# Altium integrated library Altium_Button.IntLib: 81 symbols (part 2 of 3)
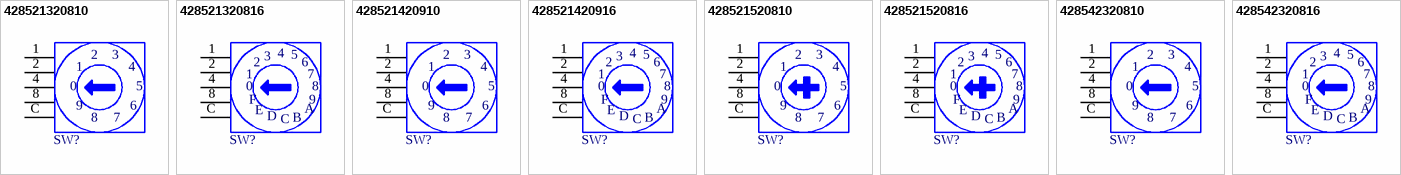
[diagram p5: symbols 428521320810 to 428542320816]

## 428542320816
designator SW?  (value not drawn)
WS-ROSV SMT Rotary Switch with Arrow Type Actuator, 7 x 7mm, Arrow Type, 16p; Manufacturer: Wurth Elektronik; Cover Material: Stainless Steel; Number of Positions: 16; Rated Current: 100mA; Rated Voltage: 42VDC; Washable: Yes; Manufacturer Part Number: 428542320816; Category: Rotary Switches; Match Code: WS-ROSV; Mount: Surface Mount; Operating Temperature Max: 125°C; Operating Temperature Min: -60°C; Packaging: Tape and Reel; Length: 7mm; Width: 7mm; Height: 3.85mm; Actuator Type: Arrow Type; Terminal Plating: Gold; Supplier 1 URL: https://www.mouser.com/ProductDetail/Wurth-Elektronik/428542320816?qs=wr8lucFkNMUrQL8A0L1uyg%3D%3D; Supplier 2 URL: https://www.digikey.com/en/products/detail/w%C3%BCrth-elektronik/428542320816/5208980; Supplier 3 URL: N/A; LCSC Part #: N/A; Supplier 1: Mouser; Supplier 1 Part Number: 710-428542320816; Supplier 2: Digi-Key; Supplier 2 Part Number: 732-6989-2-ND; Supplier 3: thegioiic; Supplier 3 Part Number: OEM; Value: 428542320816; ComponentLink1Description: Datasheet; ComponentLink1URL: https://www.we-online.com/redexpert/spec/428542320816?ad
footprint 42854232081x_16p
pins: 1, 2, 4, 8, C
text: 3; 5; 6; 7; 0; F; 9; E; A; D; B


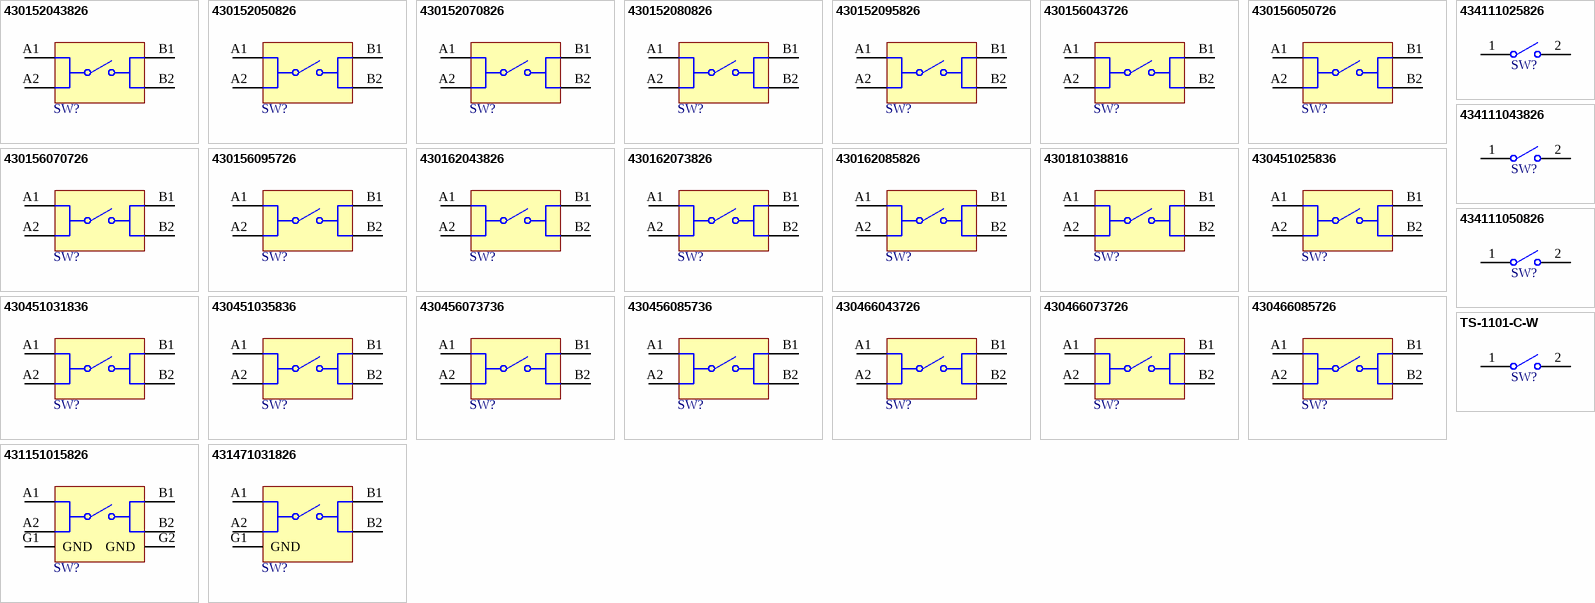
[diagram p2: symbols 430152043826 to TS-1101-C-W]

## 430152043826
designator SW?  (value not drawn)
WS-TASV SMT Tact Switch, L6 x W6 x H4.3mm, 260g, SPST-NO, 12V, 50mA; Manufacturer: Wurth Elektronik; Washable: No; Rated Voltage: 12VDC; Manufacturer Part Number: 430152043826; Category: Tact Switches; Match Code: WS-TASV; Mount: Surface Mount; Operating Temperature Max: 85°C; Operating Temperature Min: -40°C; Packaging: Tape and Reel; Length: 6mm; Width: 6mm; Height: 4.3mm; Circuit: SPST-NO; Contact Material: Stainless Steel; Operation Force: 260g; Rated Current: 50mA; Terminal Material: Copper Alloy; Terminal Plating: Silver; Supplier 1 URL: https://www.mouser.vn/ProductDetail/Wurth-Elektronik/430152043826?qs=wr8lucFkNMUjBcFj1giTsA%3D%3D; Supplier 2 URL: https://www.digikey.com/en/products/detail/w%C3%BCrth-elektronik/430152043826/5208994; Supplier 3 URL: https://www.thegioiic.com/nut-nhan-6x6mm-cao-4-3mm-4-chan-smd; LCSC Part #: N/A; ComponentLink1Description: Datasheet; ComponentLink1URL: https://www.we-online.com/redexpert/spec/430152043826?ad; Package / Case: 0805; Supplier 1: Mouser; Supplier 1 Part Number: 710-430152043826; Supplier 2: Digi-Key; Supplier 2 Part Number: 732-6991-2-ND; Supplier 3: thegioiic; Supplier 3 Part Number: OEM; Value: 430152043826
footprint WS-TASV_L6W6H4.3_4301x20438x6
pins: A1, A2, B1, B2

## 430152050826
designator SW?  (value not drawn)
WS-TASV SMT Tact Switch, L6 x W6 x H5mm, 260g, SPST-NO, 12V, 50mA; Manufacturer: Wurth Elektronik; Washable: No; Rated Voltage: 12VDC; Manufacturer Part Number: 430152050826; Category: Tact Switches; Match Code: WS-TASV; Mount: Surface Mount; Operating Temperature Max: 85°C; Operating Temperature Min: -40°C; Packaging: Tape and Reel; Length: 6mm; Width: 6mm; Height: 5mm; Circuit: SPST-NO; Contact Material: Stainless Steel; Operation Force: 260g; Rated Current: 50mA; Terminal Material: Copper Alloy; Terminal Plating: Silver; Supplier 1 URL: https://www.mouser.vn/ProductDetail/Wurth-Elektronik/430152050826?qs=wr8lucFkNMXbUWez0eOAow%3D%3D; Supplier 2 URL: https://www.digikey.com/en/products/detail/w%C3%BCrth-elektronik/430152050826/5208996; Supplier 3 URL: https://www.thegioiic.com/nut-nhan-6x6mm-cao-5mm-4-chan-smd; LCSC Part #: N/A; ComponentLink1Description: Datasheet; ComponentLink1URL: https://www.we-online.com/redexpert/spec/430152050826?ad; Package / Case: 0805; Supplier 1: Mouser; Supplier 1 Part Number: 710-430152050826; Supplier 2: Digi-Key; Supplier 2 Part Number: 732-6993-2-ND; Supplier 3: thegioiic; Supplier 3 Part Number: OEM; Value: 430152050826
footprint WS-TASV_L6W6H5_4301x20508x6
pins: A1, A2, B1, B2

## 430152070826
designator SW?  (value not drawn)
WS-TASV SMT Tact Switch, L6 x W6 x H7mm, 260g, SPST-NO, 12V, 50mA; Manufacturer: Wurth Elektronik; Washable: No; Rated Voltage: 12VDC; Manufacturer Part Number: 430152070826; Category: Tact Switches; Match Code: WS-TASV; Mount: Surface Mount; Operating Temperature Max: 85°C; Operating Temperature Min: -40°C; Packaging: Tape and Reel; Length: 6mm; Width: 6mm; Height: 7mm; Circuit: SPST-NO; Contact Material: Stainless Steel; Operation Force: 260g; Rated Current: 50mA; Terminal Material: Copper Alloy; Terminal Plating: Silver; Supplier 1 URL: https://www.mouser.vn/ProductDetail/Wurth-Elektronik/430152070826?qs=wr8lucFkNMU1ehywepWrdw%3D%3D; Supplier 2 URL: https://www.digikey.com/en/products/detail/w%C3%BCrth-elektronik/430152070826/5208998; Supplier 3 URL: https://www.thegioiic.com/nut-nhan-6x6mm-cao-7mm-4-chan-smd; LCSC Part #: N/A; ComponentLink1Description: Datasheet; ComponentLink1URL: https://www.we-online.com/redexpert/spec/430152070826?ad; Package / Case: 0805; Supplier 1: Mouser; Supplier 1 Part Number: 710-430152070826; Supplier 2: Digi-Key; Supplier 2 Part Number: 732-6995-2-ND; Supplier 3: thegioiic; Supplier 3 Part Number: OEM; Value: 430152070826
footprint WS-TASV_L6W6H7_4301x20708x6
pins: A1, A2, B1, B2

## 430152080826
designator SW?  (value not drawn)
WS-TASV SMT Tact Switch, L6 x W6 x H8mm, 260g, SPST-NO, 12V, 50mA; Manufacturer: Wurth Elektronik; Washable: No; Rated Voltage: 12VDC; Manufacturer Part Number: 430152080826; Category: Tact Switches; Match Code: WS-TASV; Mount: Surface Mount; Operating Temperature Max: 85°C; Operating Temperature Min: -40°C; Packaging: Tape and Reel; Length: 6mm; Width: 6mm; Height: 8mm; Circuit: SPST-NO; Contact Material: Stainless Steel; Operation Force: 260g; Rated Current: 50mA; Terminal Material: Copper Alloy; Terminal Plating: Silver; Supplier 1 URL: https://www.mouser.vn/ProductDetail/Wurth-Elektronik/430152080826?qs=wr8lucFkNMVrqk6KzzD5nA%3D%3D; Supplier 2 URL: https://www.digikey.com/en/products/detail/w%C3%BCrth-elektronik/430152080826/5209000; Supplier 3 URL: https://www.thegioiic.com/nut-nhan-6x6mm-cao-8mm-4-chan-smd; LCSC Part #: N/A; ComponentLink1Description: Datasheet; ComponentLink1URL: https://www.we-online.com/redexpert/spec/430152080826?ad; Package / Case: 0805; Supplier 1: Mouser; Supplier 1 Part Number: 710-430152080826; Supplier 2: Digi-Key; Supplier 2 Part Number: 732-6997-2-ND; Supplier 3: thegioiic; Supplier 3 Part Number: OEM; Value: 430152080826
footprint WS-TASV_L6W6H8_4301x20808x6
pins: A1, A2, B1, B2

## 430152095826
designator SW?  (value not drawn)
WS-TASV SMT Tact Switch, L6 x W6 x H9.5mm, 260g, SPST-NO, 12V, 50mA; Manufacturer: Wurth Elektronik; Washable: No; Rated Voltage: 12VDC; Manufacturer Part Number: 430152095826; Category: Tact Switches; Match Code: WS-TASV; Mount: Surface Mount; Operating Temperature Max: 85°C; Operating Temperature Min: -40°C; Packaging: Tape and Reel; Length: 6mm; Width: 6mm; Height: 9.5mm; Circuit: SPST-NO; Contact Material: Stainless Steel; Operation Force: 260g; Rated Current: 50mA; Terminal Material: Copper Alloy; Terminal Plating: Silver; Supplier 1 URL: https://www.mouser.vn/ProductDetail/Wurth-Elektronik/430152095826?qs=wr8lucFkNMW6hiihfkGj%2FQ%3D%3D; Supplier 2 URL: https://www.digikey.com/en/products/detail/w%C3%BCrth-elektronik/430152095826/5209002; Supplier 3 URL: https://www.thegioiic.com/nut-nhan-6x6mm-cao-9mm-4-chan-smd; LCSC Part #: N/A; ComponentLink1Description: Datasheet; ComponentLink1URL: https://www.we-online.com/redexpert/spec/430152095826?ad; Package / Case: 0805; Supplier 1: Mouser; Supplier 1 Part Number: 710-430152095826; Supplier 2: Digi-Key; Supplier 2 Part Number: 732-6999-2-ND; Supplier 3: thegioiic; Supplier 3 Part Number: OEM; Value: 430152095826
footprint WS-TASV_L6W6H9.5_4301x20958x6
pins: A1, A2, B1, B2

## 430156043726
designator SW?  (value not drawn)
WS-TATV THT Tact Switch 6x6mm, SPST-NO, 12VDC, 50mA, 260g; Manufacturer: Wurth Elektronik; Washable: No; Manufacturer Part Number: 430156043726; Category: Tact Switches; Match Code: WS-TATV; Mount: Through Hole; Operating Temperature Max: 85°C; Operating Temperature Min: -40°C; Packaging: Bulk; Length: 6mm; Width: 6mm; Height: 4.3mm; Circuit: SPST-NO; Contact Material: Stainless Steel; Operation Force: 260g; Rated Current: 50mA; Rated Voltage: 12VDC; Terminal Material: Copper Alloy; Terminal Plating: Silver; Supplier 1 URL: https://www.mouser.vn/ProductDetail/Wurth-Elektronik/430156043726?qs=wr8lucFkNMVvKRpwxYTfow%3D%3D; Supplier 2 URL: https://www.digikey.com/en/products/detail/w%C3%BCrth-elektronik/430156043726/5209006; Supplier 3 URL: https://www.thegioiic.com/nut-nhan-6x6mm-cao-4-3mm-4-chan-xuyen-lo; LCSC Part #: N/A; ComponentLink1Description: Datasheet; ComponentLink1URL: https://www.we-online.com/redexpert/spec/430156043726?ad; Package / Case: 0805; Supplier 1: Mouser; Supplier 1 Part Number: 710-430156043726; Supplier 2: Digi-Key; Supplier 2 Part Number: 430156043726-ND; Supplier 3: thegioiic; Supplier 3 Part Number: OEM; Value: 430156043726
footprint 4301x60437x6
pins: A1, A2, B1, B2

## 430156050726
designator SW?  (value not drawn)
WS-TATV THT Tact Switch 6x6mm, SPST-NO, 12VDC, 50mA, 260g; Manufacturer: Wurth Elektronik; Washable: No; Manufacturer Part Number: 430156050726; Category: Tact Switches; Match Code: WS-TATV; Mount: Through Hole; Operating Temperature Max: 85°C; Operating Temperature Min: -40°C; Packaging: Bulk; Length: 6mm; Width: 6mm; Height: 5mm; Circuit: SPST-NO; Contact Material: Stainless Steel; Operation Force: 260g; Rated Current: 50mA; Rated Voltage: 12VDC; Terminal Material: Copper Alloy; Terminal Plating: Silver; Supplier 1 URL: https://www.mouser.vn/ProductDetail/Wurth-Elektronik/430156050726?qs=wr8lucFkNMXAQ5fIFHiwBQ%3D%3D; Supplier 2 URL: https://www.digikey.com/en/products/detail/w%C3%BCrth-elektronik/430156050726/5209008; Supplier 3 URL: https://www.thegioiic.com/nut-nhan-6x6mm-cao-5mm-4-chan-xuyen-lo; LCSC Part #: N/A; ComponentLink1Description: Datasheet; ComponentLink1URL: https://www.we-online.com/redexpert/spec/430156050726?ad; Package / Case: 0805; Supplier 1: Mouser; Supplier 1 Part Number: 710-430156050726; Supplier 2: Digi-Key; Supplier 2 Part Number: 430156050726-ND; Supplier 3: thegioiic; Supplier 3 Part Number: OEM; Value: 430156050726
footprint 4301x60507x6
pins: A1, A2, B1, B2

## 430156070726
designator SW?  (value not drawn)
WS-TATV THT Tact Switch 6x6mm, SPST-NO, 12VDC, 50mA, 260g; Manufacturer: Wurth Elektronik; Washable: No; Manufacturer Part Number: 430156070726; Category: Tact Switches; Match Code: WS-TATV; Mount: Through Hole; Operating Temperature Max: 85°C; Operating Temperature Min: -40°C; Packaging: Bulk; Length: 6mm; Width: 6mm; Height: 7mm; Circuit: SPST-NO; Contact Material: Stainless Steel; Operation Force: 260g; Rated Current: 50mA; Rated Voltage: 12VDC; Terminal Material: Copper Alloy; Terminal Plating: Silver; Supplier 1 URL: https://www.mouser.vn/ProductDetail/Wurth-Elektronik/430156070726?qs=wr8lucFkNMXAOydb1CGHPQ%3D%3D; Supplier 2 URL: https://www.digikey.com/en/products/detail/w%C3%BCrth-elektronik/430156070726/5209010; Supplier 3 URL: https://www.thegioiic.com/nut-nhan-6x6mm-cao-7mm-4-chan-xuyen-lo; LCSC Part #: N/A; ComponentLink1Description: Datasheet; ComponentLink1URL: https://www.we-online.com/redexpert/spec/430156070726?ad; Package / Case: 0805; Supplier 1: Mouser; Supplier 1 Part Number: 710-430156070726; Supplier 2: Digi-Key; Supplier 2 Part Number: 430156070726-ND; Supplier 3: thegioiic; Supplier 3 Part Number: OEM; Value: 430156070726
footprint 4301x60707x6
pins: A1, A2, B1, B2

## 430156095726
designator SW?  (value not drawn)
WS-TATV THT Tact Switch 6x6mm, SPST-NO, 12VDC, 50mA, 260g; Manufacturer: Wurth Elektronik; Washable: No; Manufacturer Part Number: 430156095726; Category: Tact Switches; Match Code: WS-TATV; Mount: Through Hole; Operating Temperature Max: 85°C; Operating Temperature Min: -40°C; Packaging: Bulk; Length: 6mm; Width: 6mm; Height: 9.5mm; Circuit: SPST-NO; Contact Material: Stainless Steel; Operation Force: 260g; Rated Current: 50mA; Rated Voltage: 12VDC; Terminal Material: Copper Alloy; Terminal Plating: Silver; Supplier 1 URL: https://www.mouser.vn/ProductDetail/Wurth-Elektronik/430156095726?qs=wr8lucFkNMWrYKLaUHLBYA%3D%3D; Supplier 2 URL: https://www.digikey.com/en/products/detail/w%C3%BCrth-elektronik/430156095726/5209012; Supplier 3 URL: https://www.thegioiic.com/nut-nhan-6x6mm-cao-7mm-4-chan-xuyen-lo; LCSC Part #: N/A; ComponentLink1Description: Datasheet; ComponentLink1URL: https://www.we-online.com/redexpert/spec/430156095726?ad; Package / Case: 0805; Supplier 1: Mouser; Supplier 1 Part Number: 710-430156095726; Supplier 2: Digi-Key; Supplier 2 Part Number: 430156095726-ND; Supplier 3: thegioiic; Supplier 3 Part Number: OEM; Value: 430156095726
footprint 4301x60957x6
pins: A1, A2, B1, B2

## 430162043826
designator SW?  (value not drawn)
WS-TASV SMT Tact Switch, L12 x W12 x H4.3mm, 260g, SPST-NO, 12V, 50mA; Manufacturer: Wurth Elektronik; Washable: No; Rated Voltage: 12VDC; Manufacturer Part Number: 430162043826; Category: Tact Switches; Match Code: WS-TASV; Mount: Surface Mount; Operating Temperature Max: 85°C; Operating Temperature Min: -40°C; Packaging: Tape and Reel; Length: 12mm; Width: 12mm; Height: 4.3mm; Circuit: SPST-NO; Contact Material: Stainless Steel; Operation Force: 260g; Rated Current: 50mA; Terminal Material: Copper Alloy; Terminal Plating: Silver; Supplier 1 URL: https://www.mouser.vn/ProductDetail/Wurth-Elektronik/430162043826?qs=sPbYRqrBIVkEIWSodsnONA%3D%3D; Supplier 2 URL: https://www.digikey.com/en/products/detail/w%C3%BCrth-elektronik/430162043826/9950802; Supplier 3 URL: https://www.thegioiic.com/nut-nhan-12x12mm-cao-4-3mm-4-chan-smd; LCSC Part #: N/A; ComponentLink1Description: Datasheet; ComponentLink1URL: https://www.we-online.com/redexpert/spec/430162043826?ad; Package / Case: 0805; Supplier 1: Mouser; Supplier 1 Part Number: 710-430162043826; Supplier 2: Digi-Key; Supplier 2 Part Number: 732-13655-2-ND; Supplier 3: thegioiic; Supplier 3 Part Number: OEM; Value: 430162043826
footprint WS-TASV_L12W12H4.3_4301x20438x6
pins: A1, A2, B1, B2

## 430162073826
designator SW?  (value not drawn)
WS-TASV SMT Tact Switch, L12 x W12 x H7.3mm, 260g, SPST-NO, 12V, 50mA; Manufacturer: Wurth Elektronik; Washable: No; Rated Voltage: 12VDC; Manufacturer Part Number: 430162073826; Category: Tact Switches; Match Code: WS-TASV; Mount: Surface Mount; Operating Temperature Max: 85°C; Operating Temperature Min: -40°C; Packaging: Tape and Reel; Length: 12mm; Width: 12mm; Height: 7.3mm; Circuit: SPST-NO; Contact Material: Stainless Steel; Operation Force: 260g; Rated Current: 50mA; Terminal Material: Copper Alloy; Terminal Plating: Silver; Supplier 1 URL: https://www.mouser.vn/ProductDetail/Wurth-Elektronik/430162073826?qs=sPbYRqrBIVnU2U4pD5JJ5w%3D%3D; Supplier 2 URL: https://www.digikey.com/en/products/detail/w%C3%BCrth-elektronik/430162073826/9950803; Supplier 3 URL: https://www.thegioiic.com/nut-nhan-12x12mm-cao-7-3mm-4-chan-smd; LCSC Part #: N/A; ComponentLink1Description: Datasheet; ComponentLink1URL: https://www.we-online.com/redexpert/spec/430162073826?ad; Package / Case: 0805; Supplier 1: Mouser; Supplier 1 Part Number: 710-430162073826; Supplier 2: Digi-Key; Supplier 2 Part Number: 732-13656-2-ND; Supplier 3: thegioiic; Supplier 3 Part Number: OEM; Value: 430162073826
footprint WS-TASV_L12W12H7.3_4301x20738x6
pins: A1, A2, B1, B2

## 430162085826
designator SW?  (value not drawn)
WS-TASV SMT Tact Switch, L12 x W12 x H8.5mm, 260g, SPST-NO, 12V, 50mA; Manufacturer: Wurth Elektronik; Washable: No; Rated Voltage: 12VDC; Manufacturer Part Number: 430162085826; Category: Tact Switches; Match Code: WS-TASV; Mount: Surface Mount; Operating Temperature Max: 85°C; Operating Temperature Min: -40°C; Packaging: Tape and Reel; Length: 12mm; Width: 12mm; Height: 8.5mm; Circuit: SPST-NO; Contact Material: Stainless Steel; Operation Force: 260g; Rated Current: 50mA; Terminal Material: Copper Alloy; Terminal Plating: Silver; Supplier 1 URL: https://www.mouser.vn/ProductDetail/Wurth-Elektronik/430162085826?qs=sPbYRqrBIVnNOZ1%252Bx8%2F2Rw%3D%3D; Supplier 2 URL: https://www.digikey.com/en/products/detail/w%C3%BCrth-elektronik/430162085826/9950804?s=N4IgTCBcDaICwGYAMBGAbGJAOArFsaIAugL5A; Supplier 3 URL: N/A; LCSC Part #: N/A; ComponentLink1Description: Datasheet; ComponentLink1URL: https://www.we-online.com/redexpert/spec/430162085826?ad; Package / Case: 0805; Supplier 1: Mouser; Supplier 1 Part Number: 710-430162085826; Supplier 2: Digi-Key; Supplier 2 Part Number: 732-13657-2-ND; Supplier 3: thegioiic; Supplier 3 Part Number: OEM; Value: 430162085826
footprint WS-TASV_L12W12H8.5_4301x20858x6
pins: A1, A2, B1, B2

## 430181038816
designator SW?  (value not drawn)
WS-TASV SMT Tact Switch, L4.5 x W4.5 x H3.8mm, 160g, SPST-NO, 12V, 50mA; Manufacturer: Wurth Elektronik; Washable: No; Rated Voltage: 12VDC; Manufacturer Part Number: 430181038816; Category: Tact Switches; Match Code: WS-TASV; Mount: Surface Mount; Operating Temperature Max: 85°C; Operating Temperature Min: -40°C; Packaging: Tape and Reel; Length: 4.5mm; Width: 4.5mm; Height: 3.8mm; Circuit: SPST-NO; Contact Material: Stainless Steel; Operation Force: 160g; Rated Current: 50mA; Terminal Material: Copper Alloy; Terminal Plating: Silver; Supplier 1 URL: https://www.mouser.vn/ProductDetail/Wurth-Elektronik/430181038816?qs=wr8lucFkNMWIANaPOquJXg%3D%3D; Supplier 2 URL: https://www.digikey.com/en/products/detail/w%C3%BCrth-elektronik/430181038816/5209016?s=N4IgTCBcDaICwGYAMBGAHCpC0YGwgF0BfIA; Supplier 3 URL: https://www.thegioiic.com/nut-nhan-4-5x4-5mm-cao-3-8mm-4-chan-smd; LCSC Part #: N/A; ComponentLink1Description: Datasheet; ComponentLink1URL: https://www.we-online.com/redexpert/spec/430181038816?ad; Package / Case: 0805; Supplier 1: Mouser; Supplier 1 Part Number: 710-430181038816; Supplier 2: Digi-Key; Supplier 2 Part Number: 732-7003-2-ND; Supplier 3: thegioiic; Supplier 3 Part Number: OEM; Value: 430181038816
footprint WS-TASV_L4.5W4.5H3.8_430181038816
pins: A1, A2, B1, B2

## 430451025836
designator SW?  (value not drawn)
WS-TASV SMT Washable Tact Switch, L6 x W6 x H2.5mm, 360g, SPST-NO, 12V, 50mA; Manufacturer: Wurth Elektronik; Washable: Yes; Rated Voltage: 12VDC; Manufacturer Part Number: 430451025836; Category: Tact Switches; Match Code: WS-TASV; Mount: Surface Mount; Operating Temperature Max: 85°C; Operating Temperature Min: -40°C; Packaging: Tape and Reel; Length: 6mm; Width: 6mm; Height: 2.5mm; Circuit: SPST-NO; Contact Material: Stainless Steel; Operation Force: 360g; Rated Current: 50mA; Terminal Material: Brass; Terminal Plating: Silver; Supplier 1 URL: https://www.mouser.vn/ProductDetail/Wurth-Elektronik/430451025836?qs=wr8lucFkNMUcyG98dMqOjA%3D%3D; Supplier 2 URL: https://www.digikey.com/en/products/detail/w%C3%BCrth-elektronik/430451025836/5209028?s=N4IgTCBcDaICwGYAMcCsBGJZUA4EDYQBdAXyA; Supplier 3 URL: https://www.thegioiic.com/nut-nhan-6x6mm-cao-2-5mm-4-chan-smd-dau-do; LCSC Part #: N/A; ComponentLink1Description: Datasheet; ComponentLink1URL: https://www.we-online.com/redexpert/spec/430451025836?ad; Package / Case: 0805; Supplier 1: Mouser; Supplier 1 Part Number: 710-430451025836; Supplier 2: Digi-Key; Supplier 2 Part Number: 732-7010-2-ND; Supplier 3: thegioiic; Supplier 3 Part Number: OEM; Value: 430451025836
footprint WS-TASV_L6W6H2.5_4304x10258x6
pins: A1, A2, B1, B2

## 430451031836
designator SW?  (value not drawn)
WS-TASV SMT Washable Tact Switch, L6 x W6 x H3.1mm, 360g, SPST-NO, 12V, 50mA; Manufacturer: Wurth Elektronik; Washable: Yes; Rated Voltage: 12VDC; Manufacturer Part Number: 430451031836; Category: Tact Switches; Match Code: WS-TASV; Mount: Surface Mount; Operating Temperature Max: 85°C; Operating Temperature Min: -40°C; Packaging: Tape and Reel; Length: 6mm; Width: 6mm; Height: 3.1mm; Circuit: SPST-NO; Contact Material: Stainless Steel; Operation Force: 360g; Rated Current: 50mA; Terminal Material: Brass; Terminal Plating: Silver; Supplier 1 URL: https://www.mouser.vn/ProductDetail/Wurth-Elektronik/430451031836?qs=wr8lucFkNMUrTWmDTdbqqw%3D%3D; Supplier 2 URL: https://www.digikey.com/en/products/detail/w%C3%BCrth-elektronik/430451031836/5209029; Supplier 3 URL: N/A; LCSC Part #: N/A; ComponentLink1Description: Datasheet; ComponentLink1URL: https://www.we-online.com/redexpert/spec/430451031836?ad; Package / Case: 0805; Supplier 1: Mouser; Supplier 1 Part Number: 710-430451031836; Supplier 2: Digi-Key; Supplier 2 Part Number: 732-7011-2-ND; Supplier 3: thegioiic; Supplier 3 Part Number: OEM; Value: 430451031836
footprint WS-TASV_L6W6H3.1_4304x10318x6
pins: A1, A2, B1, B2

## 430451035836
designator SW?  (value not drawn)
WS-TASV SMT Washable Tact Switch, L6 x W6 x H3.5mm, 360g, SPST-NO, 12V, 50mA; Manufacturer: Wurth Elektronik; Washable: Yes; Rated Voltage: 12VDC; Manufacturer Part Number: 430451035836; Category: Tact Switches; Match Code: WS-TASV; Mount: Surface Mount; Operating Temperature Max: 85°C; Operating Temperature Min: -40°C; Packaging: Tape and Reel; Length: 6mm; Width: 6mm; Height: 3.5mm; Circuit: SPST-NO; Contact Material: Stainless Steel; Operation Force: 360g; Rated Current: 50mA; Terminal Material: Brass; Terminal Plating: Silver; Supplier 1 URL: https://www.mouser.vn/ProductDetail/Wurth-Elektronik/430451035836?qs=wr8lucFkNMVsx4f3WHCAuQ%3D%3D; Supplier 2 URL: https://www.digikey.com/en/products/detail/w%C3%BCrth-elektronik/430451035836/5209030; Supplier 3 URL: https://www.thegioiic.com/nut-nhan-6x6mm-cao-3-4mm-4-chan-smd-dau-do; LCSC Part #: N/A; ComponentLink1Description: Datasheet; ComponentLink1URL: https://www.we-online.com/redexpert/spec/430451035836?ad; Package / Case: 0805; Supplier 1: Mouser; Supplier 1 Part Number: 710-430451035836; Supplier 2: Digi-Key; Supplier 2 Part Number: 732-7012-2-ND; Supplier 3: thegioiic; Supplier 3 Part Number: OEM; Value: 430451035836
footprint WS-TASV_L6W6H3.5_4304x10358x6
pins: A1, A2, B1, B2

## 430456073736
designator SW?  (value not drawn)
WS-TATV THT Washable Tact Switch 12x12mm, SPST-NO, 12VDC, 50mA, 360g; Manufacturer: Wurth Elektronik; Washable: Yes; Manufacturer Part Number: 430456073736; Category: Tact Switches; Match Code: WS-TATV; Mount: Through Hole; Operating Temperature Max: 85°C; Operating Temperature Min: -40°C; Packaging: Bulk; Length: 12mm; Width: 12mm; Height: 7.3mm; Circuit: SPST-NO; Contact Material: Stainless Steel; Operation Force: 360g; Rated Current: 50mA; Rated Voltage: 12VDC; Terminal Material: Copper Alloy; Terminal Plating: Silver; Supplier 1 URL: https://www.mouser.vn/ProductDetail/Wurth-Elektronik/430456073736?qs=wr8lucFkNMXwMRqJai0DMg%3D%3D; Supplier 2 URL: https://www.digikey.com/en/products/detail/w%C3%BCrth-elektronik/430456073736/5209035; Supplier 3 URL: https://www.thegioiic.com/b3f-4055-nut-nhan-12x12mm-cao-7-3mm-4-chan-xuyen-lo-omron; LCSC Part #: N/A; ComponentLink1Description: Datasheet; ComponentLink1URL: https://www.we-online.com/redexpert/spec/430456073736?ad; Package / Case: 0805; Supplier 1: Mouser; Supplier 1 Part Number: 710-430456073736; Supplier 2: Digi-Key; Supplier 2 Part Number: 430456073736-ND; Supplier 3: thegioiic; Supplier 3 Part Number: OEM; Value: 430456073736
footprint 4304x60737x6
pins: A1, A2, B1, B2

## 430456085736
designator SW?  (value not drawn)
WS-TATV THT Washable Tact Switch 12x12mm, SPST-NO, 12VDC, 50mA, 360g; Manufacturer: Wurth Elektronik; Washable: Yes; Manufacturer Part Number: 430456085736; Category: Tact Switches; Match Code: WS-TATV; Mount: Through Hole; Operating Temperature Max: 85°C; Operating Temperature Min: -40°C; Packaging: Bulk; Length: 12mm; Width: 12mm; Height: 8.5mm; Circuit: SPST-NO; Contact Material: Stainless Steel; Operation Force: 360g; Rated Current: 50mA; Rated Voltage: 12VDC; Terminal Material: Copper Alloy; Terminal Plating: Silver; Supplier 1 URL: https://www.mouser.vn/ProductDetail/Wurth-Elektronik/430456085736?qs=wr8lucFkNMWKyynw0IFpeA%3D%3D; Supplier 2 URL: https://www.digikey.com/en/products/detail/w%C3%BCrth-elektronik/430456085736/5209036; Supplier 3 URL: N/A; LCSC Part #: N/A; ComponentLink1Description: Datasheet; ComponentLink1URL: https://www.we-online.com/redexpert/spec/430456085736?ad; Package / Case: 0805; Supplier 1: Mouser; Supplier 1 Part Number: 710-430456085736; Supplier 2: Digi-Key; Supplier 2 Part Number: 430456085736-ND; Supplier 3: thegioiic; Supplier 3 Part Number: OEM; Value: 430456085736
footprint 4304x60857x6
pins: A1, A2, B1, B2

## 430466043726
designator SW?  (value not drawn)
WS-TATV THT Washable Tact Switch 12x12mm, SPST-NO, 12VDC, 50mA, 260g; Manufacturer: Wurth Elektronik; Washable: Yes; Manufacturer Part Number: 430466043726; Category: Tact Switches; Match Code: WS-TATV; Mount: Through Hole; Operating Temperature Max: 85°C; Operating Temperature Min: -40°C; Packaging: Bulk; Length: 12mm; Width: 12mm; Height: 4.3mm; Circuit: SPST-NO; Contact Material: Stainless Steel; Operation Force: 260g; Rated Current: 50mA; Rated Voltage: 12VDC; Terminal Material: Copper Alloy; Terminal Plating: Silver; Supplier 1 URL: https://www.mouser.vn/ProductDetail/Wurth-Elektronik/430466043726?qs=wr8lucFkNMVNkuJMxWrs%2Fw%3D%3D; Supplier 2 URL: https://www.digikey.com/en/products/detail/w%C3%BCrth-elektronik/430466043726/5209037; Supplier 3 URL: https://www.thegioiic.com/nut-nhan-12x12mm-cao-4-3mm-4-chan-xuyen-lo; LCSC Part #: N/A; ComponentLink1Description: Datasheet; ComponentLink1URL: https://www.we-online.com/redexpert/spec/430466043726?ad; Package / Case: 0805; Supplier 1: Mouser; Supplier 1 Part Number: 710-430466043726; Supplier 2: Digi-Key; Supplier 2 Part Number: 430466043726-ND; Supplier 3: thegioiic; Supplier 3 Part Number: OEM; Value: 430466043726
footprint 4304x60437x6
pins: A1, A2, B1, B2

## 430466073726
designator SW?  (value not drawn)
WS-TATV THT Washable Tact Switch 12x12mm, SPST-NO, 12VDC, 50mA, 260g; Manufacturer: Wurth Elektronik; Washable: Yes; Manufacturer Part Number: 430466073726; Category: Tact Switches; Match Code: WS-TATV; Mount: Through Hole; Operating Temperature Max: 85°C; Operating Temperature Min: -40°C; Packaging: Bulk; Length: 12mm; Width: 12mm; Height: 7.3mm; Circuit: SPST-NO; Contact Material: Stainless Steel; Operation Force: 260g; Rated Current: 50mA; Rated Voltage: 12VDC; Terminal Material: Copper Alloy; Terminal Plating: Silver; Supplier 1 URL: https://www.mouser.vn/ProductDetail/Wurth-Elektronik/430466073726?qs=wr8lucFkNMU8Y7Fp1J5cEQ%3D%3D; Supplier 2 URL: https://www.digikey.com/en/products/detail/w%C3%BCrth-elektronik/430466073726/5209038; Supplier 3 URL: https://www.thegioiic.com/b3f-4055-nut-nhan-12x12mm-cao-7-3mm-4-chan-xuyen-lo-omron; LCSC Part #: N/A; ComponentLink1Description: Datasheet; ComponentLink1URL: https://www.we-online.com/redexpert/spec/430466073726?ad; Package / Case: 0805; Supplier 1: Mouser; Supplier 1 Part Number: 710-430466073726; Supplier 2: Digi-Key; Supplier 2 Part Number: 430466073726-ND; Supplier 3: thegioiic; Supplier 3 Part Number: OEM; Value: 430466073726
footprint 4304x60737x6
pins: A1, A2, B1, B2

## 430466085726
designator SW?  (value not drawn)
WS-TATV THT Washable Tact Switch 12x12mm, SPST-NO, 12VDC, 50mA, 260g; Manufacturer: Wurth Elektronik; Washable: Yes; Manufacturer Part Number: 430466085726; Category: Tact Switches; Match Code: WS-TATV; Mount: Through Hole; Operating Temperature Max: 85°C; Operating Temperature Min: -40°C; Packaging: Bulk; Length: 12mm; Width: 12mm; Height: 8.5mm; Circuit: SPST-NO; Contact Material: Stainless Steel; Operation Force: 260g; Rated Current: 50mA; Rated Voltage: 12VDC; Terminal Material: Copper Alloy; Terminal Plating: Silver; Supplier 1 URL: https://www.mouser.vn/ProductDetail/Wurth-Elektronik/430466085726?qs=wr8lucFkNMXCSGyn4y5oOA%3D%3D; Supplier 2 URL: https://www.digikey.com/en/products/detail/w%C3%BCrth-elektronik/430466085726/5209039; Supplier 3 URL: https://www.thegioiic.com/nut-nhan-12x12mm-cao-8mm-4-chan-xuyen-lo; LCSC Part #: N/A; ComponentLink1Description: Datasheet; ComponentLink1URL: https://www.we-online.com/redexpert/spec/430466085726?ad; Package / Case: 0805; Supplier 1: Mouser; Supplier 1 Part Number: 710-430466085726; Supplier 2: Digi-Key; Supplier 2 Part Number: 430466085726-ND; Supplier 3: thegioiic; Supplier 3 Part Number: OEM; Value: 430466085726
footprint 4304x60857x6
pins: A1, A2, B1, B2

## 431151015826
designator SW?  (value not drawn)
WS-TASV SMT Tact Switch with ground terminal, L5 x W5 x H1.5mm, 260g, SPST-NO, 15V, 20mA; Manufacturer: Wurth Elektronik; Washable: No; Rated Voltage: 12VDC; Manufacturer Part Number: 431151015826; Category: Tact Switches; Match Code: WS-TASV; Mount: Surface Mount; Operating Temperature Max: 85°C; Operating Temperature Min: -40°C; Packaging: Tape and Reel; Length: 5mm; Width: 5mm; Height: 1.5mm; Circuit: SPST-NO; Contact Material: Stainless Steel; Operation Force: 260g; Rated Current: 20mA; Terminal Material: Copper Alloy; Terminal Plating: Silver; Supplier 1 URL: https://www.mouser.vn/ProductDetail/Wurth-Elektronik/431151015826?qs=wr8lucFkNMWt0fEnpc%252BesA%3D%3D; Supplier 2 URL: https://www.digikey.com/en/products/detail/w%C3%BCrth-elektronik/431151015826/5209056; Supplier 3 URL: N/A; LCSC Part #: N/A; ComponentLink1Description: Datasheet; ComponentLink1URL: https://www.we-online.com/redexpert/spec/431151015826?ad; Package / Case: 0805; Supplier 1: Mouser; Supplier 1 Part Number: 710-431151015826; Supplier 2: Digi-Key; Supplier 2 Part Number: 732-7029-2-ND; Supplier 3: thegioiic; Supplier 3 Part Number: OEM; Value: 431151015826
footprint WS-TASV_L5W5H1.5_4311x10158x6
pins: A1, A2, B1, B2, G1 GND, G2 GND

## 431471031826
designator SW?  (value not drawn)
WS-TASV SMT Tact Switch with ground terminal, L6 x W6 x H3.1mm, 260g, SPST-NO, 12V, 50mA; Manufacturer: Wurth Elektronik; Washable: Yes; Rated Voltage: 12VDC; Manufacturer Part Number: 431471031826; Category: Tact Switches; Match Code: WS-TASV; Mount: Surface Mount; Operating Temperature Max: 85°C; Operating Temperature Min: -40°C; Packaging: Tape and Reel; Length: 6mm; Width: 6mm; Height: 3.1mm; Circuit: SPST-NO; Contact Material: Stainless Steel; Operation Force: 260g; Rated Current: 50mA; Terminal Material: Copper Alloy; Terminal Plating: Silver; Supplier 1 URL: https://www.mouser.vn/ProductDetail/Wurth-Elektronik/431471031826?qs=wr8lucFkNMUEyh4Xi6BS1A%3D%3D; Supplier 2 URL: https://www.digikey.com/en/products/detail/w%C3%BCrth-elektronik/431471031826/5209069; Supplier 3 URL: https://www.thegioiic.com/nut-nhan-6x6mm-cao-3-1mm-5-chan-smd-dau-do; LCSC Part #: N/A; ComponentLink1Description: Datasheet; ComponentLink1URL: https://www.we-online.com/redexpert/spec/431471031826?ad; Package / Case: 0805; Supplier 1: Mouser; Supplier 1 Part Number: 710-431471031826; Supplier 2: Digi-Key; Supplier 2 Part Number: 732-7036-2-ND; Supplier 3: thegioiic; Supplier 3 Part Number: OEM; Value: 431471031826
footprint WS-TASV_L6W6H3.1_4314x10318x6
pins: A1, A2, B1, B2, G1 GND

## 434111025826
designator SW?  (value not drawn)
WS-TASV SMT Tact Switch, L6 x W3.8 x H2.5mm, 260g, SPST-NO, 12V, 50mA; Manufacturer: Wurth Elektronik; Washable: No; Rated Voltage: 12VDC; Manufacturer Part Number: 434111025826; Category: Tact Switches; Match Code: WS-TASV; Mount: Surface Mount; Operating Temperature Max: 85°C; Operating Temperature Min: -40°C; Packaging: Tape and Reel; Length: 6mm; Width: 3.8mm; Height: 2.5mm; Circuit: SPST-NO; Contact Material: Stainless Steel; Operation Force: 260g; Rated Current: 50mA; Terminal Material: Copper Alloy; Terminal Plating: Silver; Supplier 1 URL: https://www.mouser.vn/ProductDetail/Wurth-Elektronik/434111025826?qs=wr8lucFkNMV8GC0fIi%2FYYw%3D%3D; Supplier 2 URL: https://www.digikey.com/en/products/detail/w%C3%BCrth-elektronik/434111025826/5209072; Supplier 3 URL: https://www.thegioiic.com/nut-nhan-6x3-8mm-cao-2-5mm-2-chan-smd-dau-xanh-thuong-dong; LCSC Part #: C699451; ComponentLink1Description: Datasheet; ComponentLink1URL: https://www.we-online.com/redexpert/spec/434111025826?ad; Package / Case: 0805; Supplier 1: Mouser; Supplier 1 Part Number: 710-434111025826; Supplier 2: Digi-Key; Supplier 2 Part Number: 732-7039-2-ND; Supplier 3: thegioiic; Supplier 3 Part Number: OEM; Value: 434111025826
footprint WS-TASV_L6W3.8H2.5_4341x10258x6
pins: 1, 2

## 434111043826
designator SW?  (value not drawn)
WS-TASV SMT Tact Switch, L6 x W3.5 x H4.3mm, 260g, SPST-NO, 12V, 50mA; Manufacturer: Wurth Elektronik; Washable: No; Rated Voltage: 12VDC; Manufacturer Part Number: 434111043826; Category: Tact Switches; Match Code: WS-TASV; Mount: Surface Mount; Operating Temperature Max: 85°C; Operating Temperature Min: -40°C; Packaging: Tape and Reel; Length: 6mm; Width: 3.5mm; Height: 4.3mm; Circuit: SPST-NO; Contact Material: Stainless Steel; Operation Force: 260g; Rated Current: 50mA; Terminal Material: Copper Alloy; Terminal Plating: Silver; Supplier 1 URL: https://www.mouser.vn/ProductDetail/Wurth-Elektronik/434111043826?qs=wr8lucFkNMW3koBfPj4qpQ%3D%3D; Supplier 2 URL: https://www.digikey.com/en/products/detail/w%C3%BCrth-elektronik/434111043826/5209073; Supplier 3 URL: N/A; LCSC Part #: N/A; ComponentLink1Description: Datasheet; ComponentLink1URL: https://www.we-online.com/redexpert/spec/434111043826?ad; Package / Case: 0805; Supplier 1: Mouser; Supplier 1 Part Number: 710-434111043826; Supplier 2: Digi-Key; Supplier 2 Part Number: 732-7040-2-ND; Supplier 3: thegioiic; Supplier 3 Part Number: OEM; Value: 434111043826
footprint WS-TASV_L6W3.5H4.3_4341x10438x6
pins: 1, 2

## 434111050826
designator SW?  (value not drawn)
WS-TASV SMT Tact Switch, L6 x W3.5 x H5mm, 260g, SPST-NO, 12V, 50mA; Manufacturer: Wurth Elektronik; Washable: No; Rated Voltage: 12VDC; Manufacturer Part Number: 434111050826; Category: Tact Switches; Match Code: WS-TASV; Mount: Surface Mount; Operating Temperature Max: 85°C; Operating Temperature Min: -40°C; Packaging: Tape and Reel; Length: 6mm; Width: 3.5mm; Height: 5mm; Circuit: SPST-NO; Contact Material: Stainless Steel; Operation Force: 260g; Rated Current: 50mA; Terminal Material: Copper Alloy; Terminal Plating: Silver; Supplier 1 URL: https://www.mouser.vn/ProductDetail/Wurth-Elektronik/434111050826?qs=wr8lucFkNMW%252BYjUPWhhK5A%3D%3D; Supplier 2 URL: https://www.digikey.com/en/products/detail/w%C3%BCrth-elektronik/434111050826/5209074; Supplier 3 URL: https://www.thegioiic.com/nut-nhan-3-5x6mm-cao-5mm-2-chan-smd-dau-trang; LCSC Part #: N/A; ComponentLink1Description: Datasheet; ComponentLink1URL: https://www.we-online.com/redexpert/spec/434111050826?ad; Package / Case: 0805; Supplier 1: Mouser; Supplier 1 Part Number: 710-434111050826; Supplier 2: Digi-Key; Supplier 2 Part Number: 732-7041-2-ND; Supplier 3: thegioiic; Supplier 3 Part Number: OEM; Value: 434111050826
footprint WS-TASV_L6W3.5H5_4341x10508x6
pins: 1, 2

## TS-1101-C-W
designator SW?  (value not drawn)
Tact Switch, L6 x W3.8 x H2.5mm, 260g, SPST-NO, 12V, 50mA; Manufacturer: Wurth Elektronik; Match Code: WS-TASV; Washable: No; Rated Voltage: 12VDC; Manufacturer Part Number: TS-1101-C-W; Category: Tact Switches; Mount: Surface Mount; Operating Temperature Max: 85°C; Operating Temperature Min: -40°C; Packaging: Tape and Reel; Length: 6mm; Width: 3.6mm; Height: 2.5mm; Circuit: SPST-NO; Contact Material: Stainless Steel; Operation Force: 260g; Rated Current: 50mA; Terminal Material: Copper Alloy; Terminal Plating: Silver; Supplier 1 URL: N/A; Supplier 2 URL: N/A; Supplier 3 URL: https://www.thegioiic.com/nut-nhan-3-5x6mm-cao-2-5mm-2-chan-smd-dau-do; LCSC Part #: XKB Connectivity; ComponentLink1Description: Datasheet; ComponentLink1URL: https://www.we-online.com/redexpert/spec/434111025826?ad; Package / Case: 0805; Supplier 1: Mouser; Supplier 1 Part Number: N/A; Supplier 2: Digi-Key; Supplier 2 Part Number: N/A; Supplier 3: thegioiic; Supplier 3 Part Number: OEM; Value: TS-1101-C-W
footprint TS-1101-C-W
pins: 1, 2


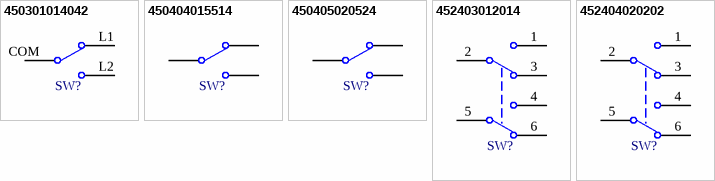
[diagram p3: symbols 450301014042 to 452404020202]

## 450301014042
designator SW?  (value not drawn)
WS-SLTV THT Mini Slide Switch, Opposite Side Connection, SPDT, 12VDC, 500mA, 800g; Manufacturer: Wurth Elektronik; Manufacturer Part Number: 450301014042; Category: Slide Switches; Match Code: WS-SLTV; Mount: Through Hole; Operating Temperature Max: 85°C; Operating Temperature Min: -40°C; Packaging: Bulk; Length: 10mm; Width: 2.5mm; Height: 6.4mm; Circuit: SPDT; Contact Material: Copper Alloy; Contact Plating: Gold; Operation Force: 800g; Rated Current: 500mA; Rated Voltage: 12VDC; Terminal Material: Copper Alloy; Terminal Plating: Gold; Supplier 1 URL: https://www.mouser.com/ProductDetail/Wurth-Elektronik/450301014042?qs=wr8lucFkNMW0uepaR4R%2Fww%3D%3D; Supplier 2 URL: https://www.digikey.com/en/products/detail/w%C3%BCrth-elektronik/450301014042/5209104; Supplier 3 URL: https://www.thegioiic.com/ss-12d00-cong-tac-truot-3-chan-xuyen-lo-on-off-1p2t-0-5a; LCSC Part #: N/A; ComponentLink1Description: Datasheet; ComponentLink1URL: https://www.we-online.com/redexpert/spec/450301014042?ad; Supplier 1: Mouser; Supplier 1 Part Number: 710-450301014042; Supplier 2: Digi-Key; Supplier 2 Part Number: 450301014042-ND; Supplier 3: thegioiic; Supplier 3 Part Number: SS-12D00; Value: 450301014042
footprint 450301014042 (THT Mini Slide Switch, body 10x2.5mm)
pins: COM, L1, L2

## 450404015514
designator SW?  (value not drawn)
WS-SLSU Mini Slide Switch, Same Side Connection Side Push, SPDT, 5VDC, 300mA, 240g; Manufacturer: Wurth Elektronik; Manufacturer Part Number: 450404015514; Category: Slide Switches; Match Code: WS-SLSU; Mount: Surface Mount; Operating Temperature Max: 85°C; Operating Temperature Min: -40°C; Packaging: Tape and Reel; Length: 6.7mm; Width: 2.7mm; Height: 1.1mm; Circuit: SPDT; Contact Material: Copper Alloy; Contact Plating: Silver; Operation Force: 240g; Rated Current: 300mA; Rated Voltage: 5VDC; Terminal Material: Copper Alloy; Terminal Plating: Silver; Supplier 1 URL: https://www.mouser.com/ProductDetail/Wurth-Elektronik/450404015514?qs=sPbYRqrBIVk21%2FxsES2IZA%3D%3D; Supplier 2 URL: https://www.digikey.com/en/products/detail/w%C3%BCrth-elektronik/450404015514/9950812; Supplier 3 URL: https://www.thegioiic.com/msk-12c02-cong-tac-truot-7-chan-on-off-smd-chinh-ngang-1p2t-0-5a; LCSC Part #: N/A; ComponentLink1Description: Datasheet; ComponentLink1URL: https://www.we-online.com/redexpert/spec/450404015514?ad; Supplier 1: Mouser; Supplier 1 Part Number: 710-450404015514; Supplier 2: Digi-Key; Supplier 2 Part Number: 732-13665-2-ND; Supplier 3: thegioiic; Supplier 3 Part Number: MSK-12C02; Value: 450404015514
footprint 450404015514 (Right angle Slide Switch)
pins: COM, L1, L2

## 450405020524
designator SW?  (value not drawn)
WS-SLSU SMT Mini Slide Switch Same Side Connection, SPDT, 5VDC, 300mA, 225g; Manufacturer: Wurth Elektronik; Manufacturer Part Number: 450405020524; Category: Slide Switches; Match Code: WS-SLSU; Mount: Surface Mount; Operating Temperature Max: 85°C; Operating Temperature Min: -40°C; Packaging: Tape and Reel; Length: 8.7mm; Width: 3mm; Height: 2mm; Circuit: SPDT; Contact Material: Copper Alloy; Contact Plating: Silver; Operation Force: 225g; Rated Current: 300mA; Rated Voltage: 5VDC; Terminal Material: Copper Alloy; Terminal Plating: Silver; Supplier 1 URL: https://www.mouser.com/ProductDetail/Wurth-Elektronik/450405020524?qs=OlC7AqGiEDnl%252BU2cnq%252B3rQ%3D%3D; Supplier 2 URL: https://www.digikey.com/en/products/detail/w%C3%BCrth-elektronik/450405020524/11627297; Supplier 3 URL: N/A; LCSC Part #: N/A; ComponentLink1Description: Datasheet; ComponentLink1URL: https://www.we-online.com/redexpert/spec/450405020524?ad; Supplier 1: Mouser; Supplier 1 Part Number: 710-450405020524; Supplier 2: Digi-Key; Supplier 2 Part Number: 732-450405020524TR-ND; Supplier 3: thegioiic; Supplier 3 Part Number: N/A; Value: 450405020524
footprint 450405020524
pins: COM, L1, L2

## 452403012014
designator SW?  (value not drawn)
WS-SLSV SMT Mini Slide Switch, Same Side Connection, DPDT, 6VDC, 300mA, 350g; Manufacturer: Wurth Elektronik; Manufacturer Part Number: 452403012014; Category: Slide Switches; Match Code: WS-SLSV; Mount: Surface Mount; Operating Temperature Max: 85°C; Operating Temperature Min: -40°C; Packaging: Tape and Reel; Length: 7.7mm; Width: 5.5mm; Height: 3.3mm; Circuit: DPDT; Contact Material: Copper Alloy; Contact Plating: Silver; Operation Force: 350g; Rated Current: 300mA; Rated Voltage: 6VDC; Terminal Material: Copper Alloy; Terminal Plating: Silver; Supplier 1 URL: https://www.mouser.com/ProductDetail/Wurth-Elektronik/452403012014?qs=DvsTirrhYfOi0QxHyAEO3w%3D%3D; Supplier 2 URL: https://www.digikey.com/en/products/detail/w%C3%BCrth-elektronik/452403012014/5956412; Supplier 3 URL: N/A; LCSC Part #: N/A; ComponentLink1Description: Datasheet; ComponentLink1URL: https://www.we-online.com/redexpert/spec/452403012014?ad; Supplier 1: Mouser; Supplier 1 Part Number: 710-452403012014; Supplier 2: Digi-Key; Supplier 2 Part Number: 732-10145-2-ND; Supplier 3: thegioiic; Supplier 3 Part Number: N/A; Value: 452403012014
footprint 452403012014
pins: 1, 2 COM, 3, 4, 5 COM, 6

## 452404020202
designator SW?  (value not drawn)
WS-SLTV THT Mini Slide Switch, Same Side Connection, DPDT, 6VDC, 300mA, 450g; Manufacturer: Wurth Elektronik; Manufacturer Part Number: 452404020202; Category: Slide Switches; Match Code: WS-SLTV; Mount: Through Hole; Operating Temperature Max: 85°C; Operating Temperature Min: -40°C; Packaging: Bulk; Length: 9mm; Width: 3.8mm; Height: 5.5mm; Circuit: DPDT; Contact Material: Copper Alloy; Contact Plating: Silver; Operation Force: 450g; Rated Current: 300mA; Rated Voltage: 6VDC; Terminal Material: Copper Alloy; Terminal Plating: Silver; Supplier 1 URL: https://www.mouser.com/ProductDetail/Wurth-Elektronik/452404020202?qs=sPbYRqrBIVktTZStfNgfZw%3D%3D; Supplier 2 URL: https://www.digikey.com/en/products/detail/w%C3%BCrth-elektronik/452404020202/9950813; Supplier 3 URL: https://www.thegioiic.com/mss-22d18-cong-tac-truot-6-chan-xuyen-lo-on-on-2p2t-0-5a; LCSC Part #: N/A; ComponentLink1Description: Datasheet; ComponentLink1URL: https://www.we-online.com/redexpert/spec/452404020202?ad; Supplier 1: Mouser; Supplier 1 Part Number: 710-452404020202; Supplier 2: Digi-Key; Supplier 2 Part Number: 732-13666-ND; Supplier 3: thegioiic; Supplier 3 Part Number: MSS-22D18; Value: 452404020202
footprint 452404020202
pins: 1, 2 COM, 3, 4, 5 COM, 6


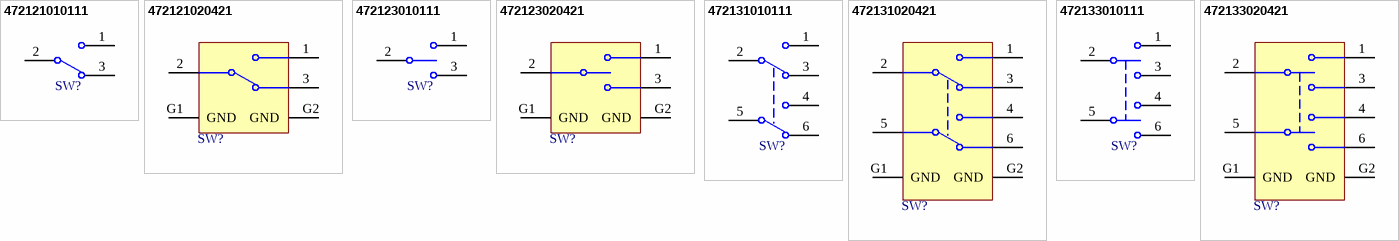
[diagram p4: symbols 472121010111 to 472133020421]

## 472121010111
designator SW?  (value not drawn)
WS-TOTV Ø 6.35mm Panel Cut-Out Vertical Operation Toggle Switch, SPDT, ON-ON, 30V, 1A; Manufacturer: Wurth Elektronik; Actuator Length: 10.4mm; Bushing Length: 9mm; Insulation Resistance: 1000MOhm; Withstanding Voltage: 500VAC; Manufacturer Part Number: 472121010111; Category: Toggle Switches; Match Code: WS-TOTV; Mount: Through Hole; Operating Temperature Max: 85°C; Operating Temperature Min: -40°C; Packaging: Tray; Length: 12.7mm; Width: 6.6mm; Height: 28.2mm; Circuit: SPDT; Rated Current: 1A; Rated Voltage (DC): 30V; Switching Function: ON-ON; Supplier 2 URL: https://www.mouser.com/ProductDetail/Wurth-Elektronik/472121010111?qs=ufv2HEpFn%252BQVepSzX5xo1g%3D%3D; Supplier 2 URL: https://www.digikey.com/en/products/detail/w%C3%BCrth-elektronik/472121010111/18735354; Supplier 3 URL: N/A; LCSC Part #: N/A; ComponentLink1Description: Datasheet; ComponentLink1URL: https://www.we-online.com/redexpert/spec/472121010111?ad; Supplier 1: Mouser; Supplier 1 Part Number: 710-472121010111; Supplier 1 URL: N/A; Supplier 2: Digi-Key; Supplier 2 Part Number: 732-472121010111-ND; Supplier 3: thegioiic; Supplier 3 Part Number: OEM; Value: 472121010111
footprint 472121010111
pins: 1, 2, 3

## 472121020421
designator SW?  (value not drawn)
WS-TOTV Ø 6.35mm Panel Cut-Out Right Angle Operation Toggle Switch, SPDT, ON-ON, 30V, 1A; Manufacturer: Wurth Elektronik; Actuator Length: 6.7mm; Insulation Resistance: 1000MOhm; Withstanding Voltage: 500VAC; Manufacturer Part Number: 472121020421; Category: Toggle Switches; Match Code: WS-TOTV; Mount: Through Hole; Operating Temperature Max: 85°C; Operating Temperature Min: -40°C; Packaging: Tray; Length: 12.7mm; Width: 22.6mm; Height: 6.6mm; Bushing Length: 6.7mm; Circuit: SPDT; Rated Current: 1A; Rated Voltage (DC): 30V; Switching Function: ON-ON; Supplier 2 URL: https://www.mouser.com/ProductDetail/Wurth-Elektronik/472121020421?qs=ufv2HEpFn%252BQSoNsZ3daIcw%3D%3D; Supplier 2 URL: https://www.digikey.com/en/products/detail/w%C3%BCrth-elektronik/472121020421/18735383; Supplier 3 URL: N/A; LCSC Part #: N/A; ComponentLink1Description: Datasheet; ComponentLink1URL: https://www.we-online.com/redexpert/spec/472121020421?ad; Supplier 1: Mouser; Supplier 1 Part Number: 710-472121020421; Supplier 1 URL: N/A; Supplier 2: Digi-Key; Supplier 2 Part Number: 732-472121020421-ND; Supplier 3: thegioiic; Supplier 3 Part Number: OEM; Value: 472121020421
footprint 472121020421
pins: 1, 2, 3, G1 GND, G2 GND

## 472123010111
designator SW?  (value not drawn)
WS-TOTV Ø 6.35mm Panel Cut-Out Vertical Operation Toggle Switch, SPDT, ON-OFF-ON, 30V, 1A; Manufacturer: Wurth Elektronik; Actuator Length: 10.7mm; Bushing Length: 9mm; Insulation Resistance: 1000MOhm; Withstanding Voltage: 500VAC; Manufacturer Part Number: 472123010111; Category: Toggle Switches; Match Code: WS-TOTV; Mount: Through Hole; Operating Temperature Max: 85°C; Operating Temperature Min: -40°C; Packaging: Tray; Length: 12.7mm; Width: 6.6mm; Height: 28.5mm; Circuit: SPDT; Rated Current: 1A; Rated Voltage (DC): 30V; Switching Function: ON-OFF-ON; Supplier 2 URL: https://www.mouser.com/ProductDetail/Wurth-Elektronik/472123010111?qs=ufv2HEpFn%252BS%2Fx6phQxj%2FUQ%3D%3D; Supplier 2 URL: https://www.digikey.com/en/products/detail/w%C3%BCrth-elektronik/472123010111/18735355; Supplier 3 URL: N/A; LCSC Part #: N/A; ComponentLink1Description: Datasheet; ComponentLink1URL: https://www.we-online.com/redexpert/spec/472123010111?ad; Supplier 1: Mouser; Supplier 1 Part Number: 710-472123010111; Supplier 1 URL: N/A; Supplier 2: Digi-Key; Supplier 2 Part Number: 732-472123010111-ND; Supplier 3: thegioiic; Supplier 3 Part Number: OEM; Value: 472123010111
footprint 472123010111
pins: 1, 2, 3

## 472123020421
designator SW?  (value not drawn)
WS-TOTV Ø 6.35mm Panel Cut-Out Right Angle Operation Toggle Switch, SPDT, ON-OFF-ON, 30V, 1A; Manufacturer: Wurth Elektronik; Actuator Length: 7mm; Insulation Resistance: 1000MOhm; Withstanding Voltage: 500VAC; Manufacturer Part Number: 472123020421; Category: Toggle Switches; Match Code: WS-TOTV; Mount: Through Hole; Operating Temperature Max: 85°C; Operating Temperature Min: -40°C; Packaging: Tray; Length: 12.7mm; Width: 22.9mm; Height: 6.6mm; Bushing Length: 7mm; Circuit: SPDT; Rated Current: 1A; Rated Voltage (DC): 30V; Switching Function: ON-OFF-ON; Supplier 2 URL: https://www.mouser.com/ProductDetail/Wurth-Elektronik/472123020421?qs=ufv2HEpFn%252BSjVpf9eX53NQ%3D%3D; Supplier 2 URL: https://www.digikey.com/en/products/detail/w%C3%BCrth-elektronik/472123020421/18735346; Supplier 3 URL: N/A; LCSC Part #: N/A; ComponentLink1Description: Datasheet; ComponentLink1URL: https://www.we-online.com/redexpert/spec/472123020421?ad; Supplier 1: Mouser; Supplier 1 Part Number: 710-472123020421; Supplier 1 URL: N/A; Supplier 2: Digi-Key; Supplier 2 Part Number: 732-472123020421-ND; Supplier 3: thegioiic; Supplier 3 Part Number: OEM; Value: 472123020421
footprint 472123020421
pins: 1, 2, 3, G1 GND, G2 GND

## 472131010111
designator SW?  (value not drawn)
WS-TOTV Ø 6.35mm Panel Cut-Out Vertical Operation Toggle Switch, DPDT, ON-ON, 30V, 1A; Manufacturer: Wurth Elektronik; Actuator Length: 10.4mm; Bushing Length: 9mm; Insulation Resistance: 1000MOhm; Withstanding Voltage: 500VAC; Manufacturer Part Number: 472131010111; Category: Toggle Switches; Match Code: WS-TOTV; Mount: Through Hole; Operating Temperature Max: 85°C; Operating Temperature Min: -40°C; Packaging: Tray; Length: 12.7mm; Width: 11.4mm; Height: 29.6mm; Circuit: DPDT; Rated Current: 1A; Rated Voltage (DC): 30V; Switching Function: ON-ON; Supplier 2 URL: https://www.mouser.com/ProductDetail/Wurth-Elektronik/472131010111?qs=ufv2HEpFn%252BT2jljNPdn4Ng%3D%3D; Supplier 2 URL: https://www.digikey.com/en/products/detail/w%C3%BCrth-elektronik/472131010111/18735373; Supplier 3 URL: N/A; LCSC Part #: N/A; ComponentLink1Description: Datasheet; ComponentLink1URL: https://www.we-online.com/redexpert/spec/472131010111?ad; Supplier 1: Mouser; Supplier 1 Part Number: 710-472131010111; Supplier 1 URL: N/A; Supplier 2: Digi-Key; Supplier 2 Part Number: 732-472131010111-ND; Supplier 3: thegioiic; Supplier 3 Part Number: OEM; Value: 472131010111
footprint 472131010111
pins: 1, 2, 3, 4, 5, 6

## 472131020421
designator SW?  (value not drawn)
WS-TOTV Ø 6.35mm Panel Cut-Out Right Angle Operation Toggle Switch, DPDT, ON-ON, 30V, 1A; Manufacturer: Wurth Elektronik; Actuator Length: 6.7mm; Insulation Resistance: 1000MOhm; Withstanding Voltage: 500VAC; Manufacturer Part Number: 472131020421; Category: Toggle Switches; Match Code: WS-TOTV; Mount: Through Hole; Operating Temperature Max: 85°C; Operating Temperature Min: -40°C; Packaging: Tray; Length: 12.7mm; Width: 22.6mm; Height: 11.4mm; Bushing Length: 6.7mm; Circuit: DPDT; Rated Current: 1A; Rated Voltage (DC): 30V; Switching Function: ON-ON; Supplier 2 URL: https://www.mouser.com/ProductDetail/Wurth-Elektronik/472131020421?qs=ufv2HEpFn%252BRpY8C6PE%252BOOw%3D%3D; Supplier 2 URL: https://www.digikey.com/en/products/detail/w%C3%BCrth-elektronik/472131020421/18735356; Supplier 3 URL: N/A; LCSC Part #: N/A; ComponentLink1Description: Datasheet; ComponentLink1URL: https://www.we-online.com/redexpert/spec/472131020421?ad; Supplier 1: Mouser; Supplier 1 Part Number: 710-472131020421; Supplier 1 URL: N/A; Supplier 2: Digi-Key; Supplier 2 Part Number: 732-472131020421-ND; Supplier 3: thegioiic; Supplier 3 Part Number: OEM; Value: 472131020421
footprint 472131020421
pins: 1, 2, 3, 4, 5, 6, G1 GND, G2 GND